# Altium footprint library CoilcraftPCB.PcbLib: 320 footprints (part 16 of 20)
Each footprint in its own frame and in the unit in brackets; x right, y up, seen from the top. Pads: shape width x height; smd on the part's side, far side on the other; paste and mask are expansions set on the pad; w line width, h text height; cw(c..) or ccw(c..) is an arc to the next point about the centre after c.
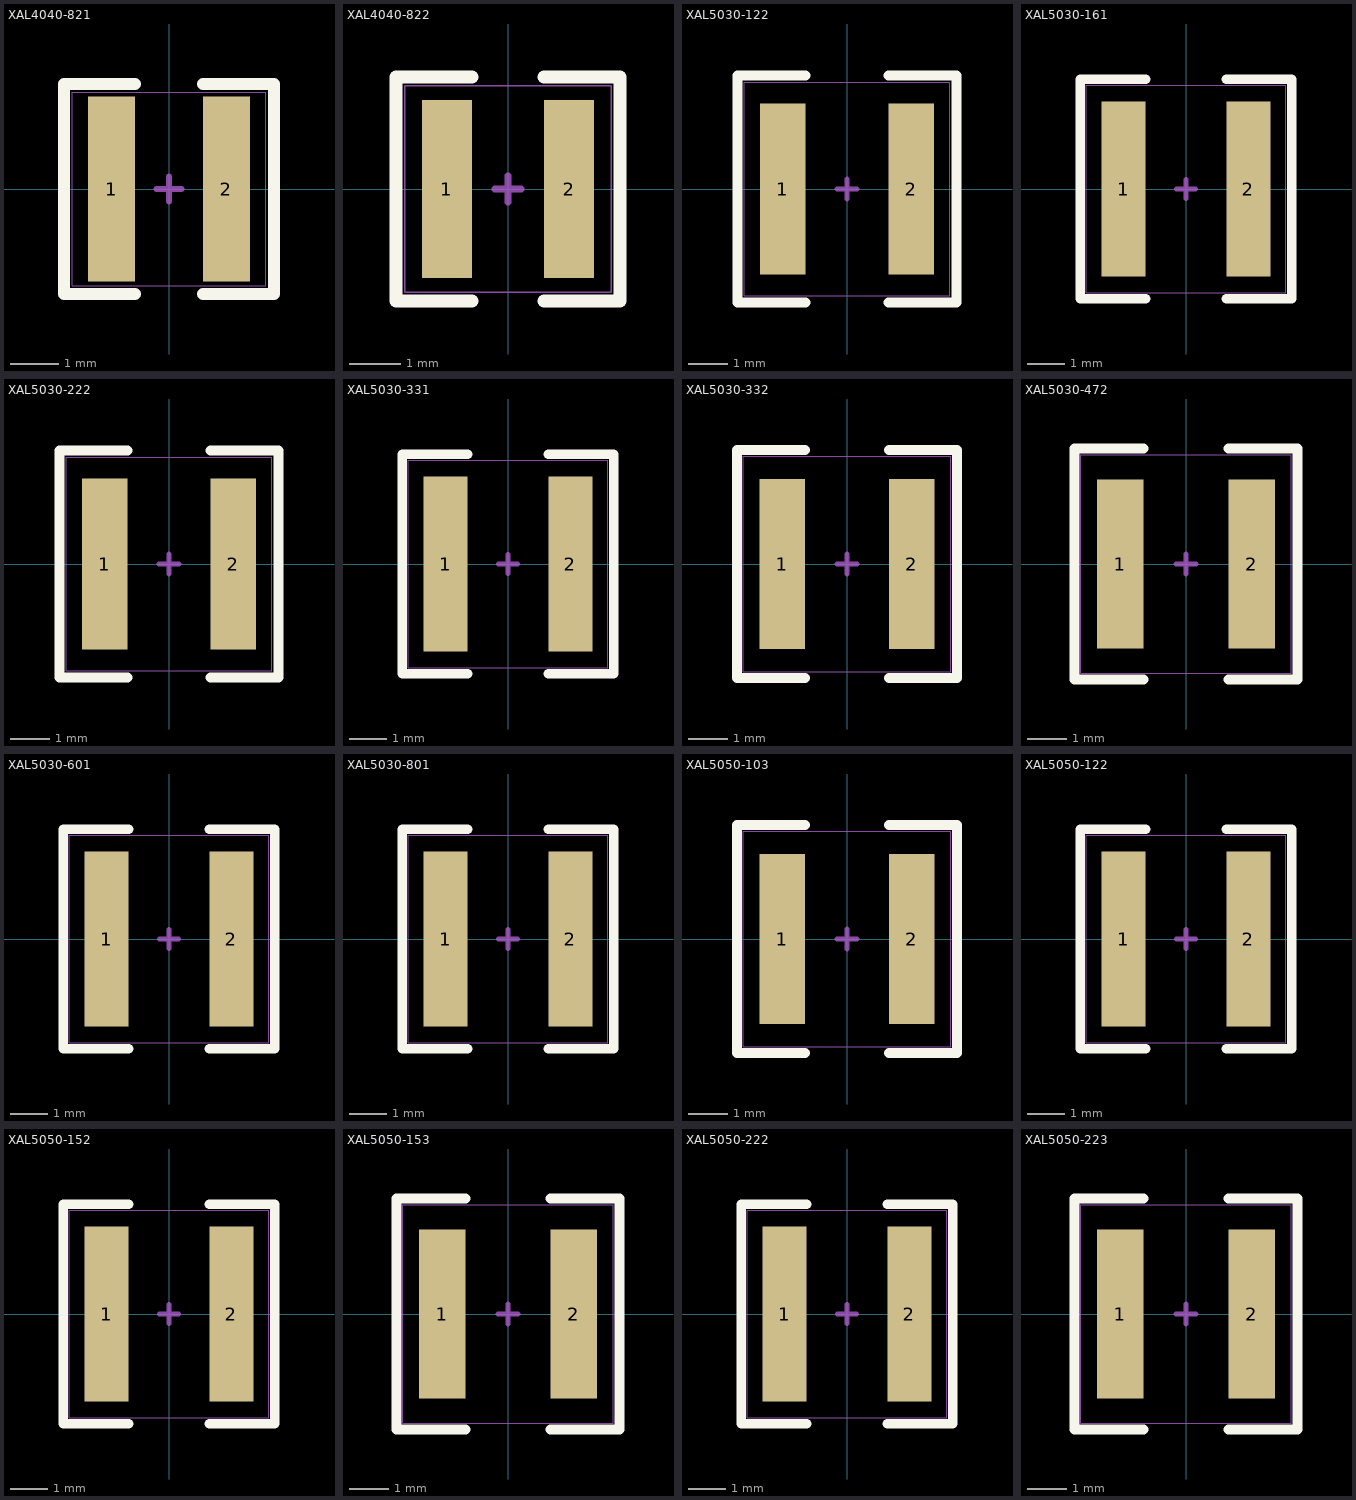
[diagram p15: the footprints below, top view; thin cyan lines are the x and y axes]

## XAL4040-821 [mil] "Coilcraft High Temperature Shielded Power Inductors"
height 161
pads (2):
  rect 38x150 smd: 1(-46.5,0) 2(46.5,0)
Top Overlay:
  lines w10: -27.5,-85 -85,-85 -85,85 -27.5,85 ; 27.5,-85 85,-85 85,85 27.5,85
Mechanical 13:
  lines w5: -10,0 10,0 ; 0,-10 0,10
Mechanical 14:
  lines w1: -78.5,-78.5 -78.5,78.5 78.5,78.5 78.5,-78.5 -78.5,-78.5
3D body: height 161.48, standoff 0.06, extent -84.65,-84.65 84.64,84.64

## XAL4040-822 [mil] "Coilcraft High Temperature Shielded Power Inductors"
height 161
pads (2):
  rect 38x135 smd: 1(-46.5,0) 2(46.5,0)
Top Overlay:
  lines w10: -27.5,-85 -85,-85 -85,85 -27.5,85 ; 27.5,-85 85,-85 85,85 27.5,85
Mechanical 13:
  lines w5: -10,0 10,0 ; 0,-10 0,10
Mechanical 14:
  lines w1: -78.5,-78.5 -78.5,78.5 78.5,78.5 78.5,-78.5 -78.5,-78.5
3D body: height 161.48, standoff 0.06, extent -84.65,-84.65 84.64,84.64

## XAL5030-122 [mil] "Coilcraft High Temperature Shielded Power Inductors"
height 122
pads (2):
  rect 46x173 smd: 1(-65,0) 2(65,0)
Top Overlay:
  lines w10: -42,-114.5 -110.5,-114.5 -110.5,114.5 -42,114.5 ; 42,-114.5 110.5,-114.5 110.5,114.5 42,114.5
Mechanical 13:
  lines w5: -10,0 10,0 ; 0,-10 0,10
Mechanical 14:
  lines w1: -104,-108 104,-108 104,108 -104,108 -104,-108
3D body: height 122.11, standoff 0.06, extent -107.88,-111.81 107.87,111.81

## XAL5030-161 [mil] "Coilcraft High Temperature Shielded Power Inductors"
height 122
pads (2):
  rect 46x183 smd: 1(-65,0) 2(65,0)
Top Overlay:
  lines w10: -42,-114.5 -110.5,-114.5 -110.5,114.5 -42,114.5 ; 42,-114.5 110.5,-114.5 110.5,114.5 42,114.5
Mechanical 13:
  lines w5: -10,0 10,0 ; 0,-10 0,10
Mechanical 14:
  lines w1: -104,-108 -104,108 104,108 104,-108 -104,-108
3D body: height 122.11, standoff 0.06, extent -107.88,-111.81 107.87,111.81

## XAL5030-222 [mil] "Coilcraft High Temperature Shielded Power Inductors"
height 122
pads (2):
  rect 46x173 smd: 1(-65,0) 2(65,0)
Top Overlay:
  lines w10: -42,-114.5 -110.5,-114.5 -110.5,114.5 -42,114.5 ; 42,-114.5 110.5,-114.5 110.5,114.5 42,114.5
Mechanical 13:
  lines w5: -10,0 10,0 ; 0,-10 0,10
Mechanical 14:
  lines w1: -104,-108 104,-108 104,108 -104,108 -104,-108
3D body: height 122.11, standoff 0.06, extent -107.88,-111.81 107.87,111.81

## XAL5030-331 [mil] "Coilcraft High Temperature Shielded Power Inductors"
height 122
pads (2):
  rect 46x183 smd: 1(-65,0) 2(65,0)
Top Overlay:
  lines w10: -42,-114.5 -110.5,-114.5 -110.5,114.5 -42,114.5 ; 42,-114.5 110.5,-114.5 110.5,114.5 42,114.5
Mechanical 13:
  lines w5: -10,0 10,0 ; 0,-10 0,10
Mechanical 14:
  lines w1: -104,-108 104,-108 104,108 -104,108 -104,-108
3D body: height 122.11, standoff 0.06, extent -107.88,-111.81 107.87,111.81

## XAL5030-332 [mil] "Coilcraft High Temperature Shielded Power Inductors"
height 122
pads (2):
  rect 46x171 smd: 1(-65,0) 2(65,0)
Top Overlay:
  lines w10: -42,-114.5 -110.5,-114.5 -110.5,114.5 -42,114.5 ; 42,-114.5 110.5,-114.5 110.5,114.5 42,114.5
Mechanical 13:
  lines w5: -10,0 10,0 ; 0,-10 0,10
Mechanical 14:
  lines w1: -104,-108 104,-108 104,108 -104,108 -104,-108
3D body: height 122.11, standoff 0.06, extent -107.88,-111.81 107.87,111.81

## XAL5030-472 [mil] "Coilcraft High Temperature Shielded Power Inductors"
height 122
pads (2):
  rect 46x167 smd: 1(-65,0) 2(65,0)
Top Overlay:
  lines w10: -42,-114.5 -110.5,-114.5 -110.5,114.5 -42,114.5 ; 42,-114.5 110.5,-114.5 110.5,114.5 42,114.5
Mechanical 13:
  lines w5: -10,0 10,0 ; 0,-10 0,10
Mechanical 14:
  lines w1: -104,-108 104,-108 104,108 -104,108 -104,-108
3D body: height 122.11, standoff 0.06, extent -107.88,-111.81 107.87,111.81

## XAL5030-601 [mil] "Coilcraft High Temperature Shielded Power Inductors"
height 122
pads (2):
  rect 46x183 smd: 1(-65,0) 2(65,0)
Top Overlay:
  lines w10: -42,-114.5 -110.5,-114.5 -110.5,114.5 -42,114.5 ; 42,-114.5 110.5,-114.5 110.5,114.5 42,114.5
Mechanical 13:
  lines w5: -10,0 10,0 ; 0,-10 0,10
Mechanical 14:
  lines w1: -104,-108 104,-108 104,108 -104,108 -104,-108
3D body: height 122.11, standoff 0.06, extent -107.88,-111.81 107.87,111.81

## XAL5030-801 [mil] "Coilcraft High Temperature Shielded Power Inductors"
height 122
pads (2):
  rect 46x183 smd: 1(-65,0) 2(65,0)
Top Overlay:
  lines w10: -42,-114.5 -110.5,-114.5 -110.5,114.5 -42,114.5 ; 42,-114.5 110.5,-114.5 110.5,114.5 42,114.5
Mechanical 13:
  lines w5: -10,0 10,0 ; 0,-10 0,10
Mechanical 14:
  lines w1: -104,-108 104,-108 104,108 -104,108 -104,-108
3D body: height 122.11, standoff 0.06, extent -107.88,-111.81 107.87,111.81

## XAL5050-103 [mil] "Coilcraft High Temperature Shielded Power Inductors"
height 201
pads (2):
  rect 46x171 smd: 1(-65,0) 2(65,0)
Top Overlay:
  lines w10: -42,-114.5 -110.5,-114.5 -110.5,114.5 -42,114.5 ; 42,-114.5 110.5,-114.5 110.5,114.5 42,114.5
Mechanical 13:
  lines w5: -10,0 10,0 ; 0,-10 0,10
Mechanical 14:
  lines w1: -104,-108 -104,108 104,108 104,-108 -104,-108
3D body: height 200.85, standoff 0.06, extent -107.88,-111.81 107.87,111.81

## XAL5050-122 [mil] "Coilcraft High Temperature Shielded Power Inductors"
height 201
pads (2):
  rect 46x183 smd: 1(-65,0) 2(65,0)
Top Overlay:
  lines w10: -42,-114.5 -110.5,-114.5 -110.5,114.5 -42,114.5 ; 42,-114.5 110.5,-114.5 110.5,114.5 42,114.5
Mechanical 13:
  lines w5: -10,0 10,0 ; 0,-10 0,10
Mechanical 14:
  lines w1: -104,-108 -104,108 104,108 104,-108 -104,-108
3D body: height 201, standoff 0, extent -107.88,-111.81 107.88,111.81

## XAL5050-152 [mil] "Coilcraft High Temperature Shielded Power Inductors"
height 201
pads (2):
  rect 46x183 smd: 1(-65,0) 2(65,0)
Top Overlay:
  lines w10: -42,-114.5 -110.5,-114.5 -110.5,114.5 -42,114.5 ; 42,-114.5 110.5,-114.5 110.5,114.5 42,114.5
Mechanical 13:
  lines w5: -10,0 10,0 ; 0,-10 0,10
Mechanical 14:
  lines w1: -104,-108 104,-108 104,108 -104,108 -104,-108
3D body: height 201, standoff 0, extent -104,-108 104,108

## XAL5050-153 [mil] "Coilcraft High Temperature Shielded Power Inductors"
height 201
pads (2):
  rect 46x167 smd: 1(-65,0) 2(65,0)
Top Overlay:
  lines w10: -42,-114.5 -110.5,-114.5 -110.5,114.5 -42,114.5 ; 42,-114.5 110.5,-114.5 110.5,114.5 42,114.5
Mechanical 13:
  lines w5: -10,0 10,0 ; 0,-10 0,10
Mechanical 14:
  lines w1: -104,-108 -104,108 104,108 104,-108 -104,-108
3D body: height 200.85, standoff 0.06, extent -107.88,-111.81 107.87,111.81

## XAL5050-222 [mil] "Coilcraft High Temperature Shielded Power Inductors"
height 201
pads (2):
  rect 46x183 smd: 1(-65,0) 2(65,0)
Top Overlay:
  lines w10: -42,-114.5 -110.5,-114.5 -110.5,114.5 -42,114.5 ; 42,-114.5 110.5,-114.5 110.5,114.5 42,114.5
Mechanical 13:
  lines w5: -10,0 10,0 ; 0,-10 0,10
Mechanical 14:
  lines w1: -104,-108 -104,108 104,108 104,-108 -104,-108
3D body: height 201, standoff 0, extent -104,-108 104,108

## XAL5050-223 [mil] "Coilcraft High Temperature Shielded Power Inductors"
height 201
pads (2):
  rect 46x167 smd: 1(-65,0) 2(65,0)
Top Overlay:
  lines w10: -42,-114.5 -110.5,-114.5 -110.5,114.5 -42,114.5 ; 42,-114.5 110.5,-114.5 110.5,114.5 42,114.5
Mechanical 13:
  lines w5: -10,0 10,0 ; 0,-10 0,10
Mechanical 14:
  lines w1: -104,-108 -104,108 104,108 104,-108 -104,-108
3D body: height 200.85, standoff 0.06, extent -107.88,-111.81 107.87,111.81